# Altium footprint library Connector-Audio.PcbLib: 29 footprints (part 2 of 2)
Each footprint in its own frame and in the unit in brackets; x right, y up, seen from the top. Pads: shape width x height; smd on the part's side, far side on the other; paste and mask are expansions set on the pad; w line width, h text height; cw(c..) or ccw(c..) is an arc to the next point about the centre after c.
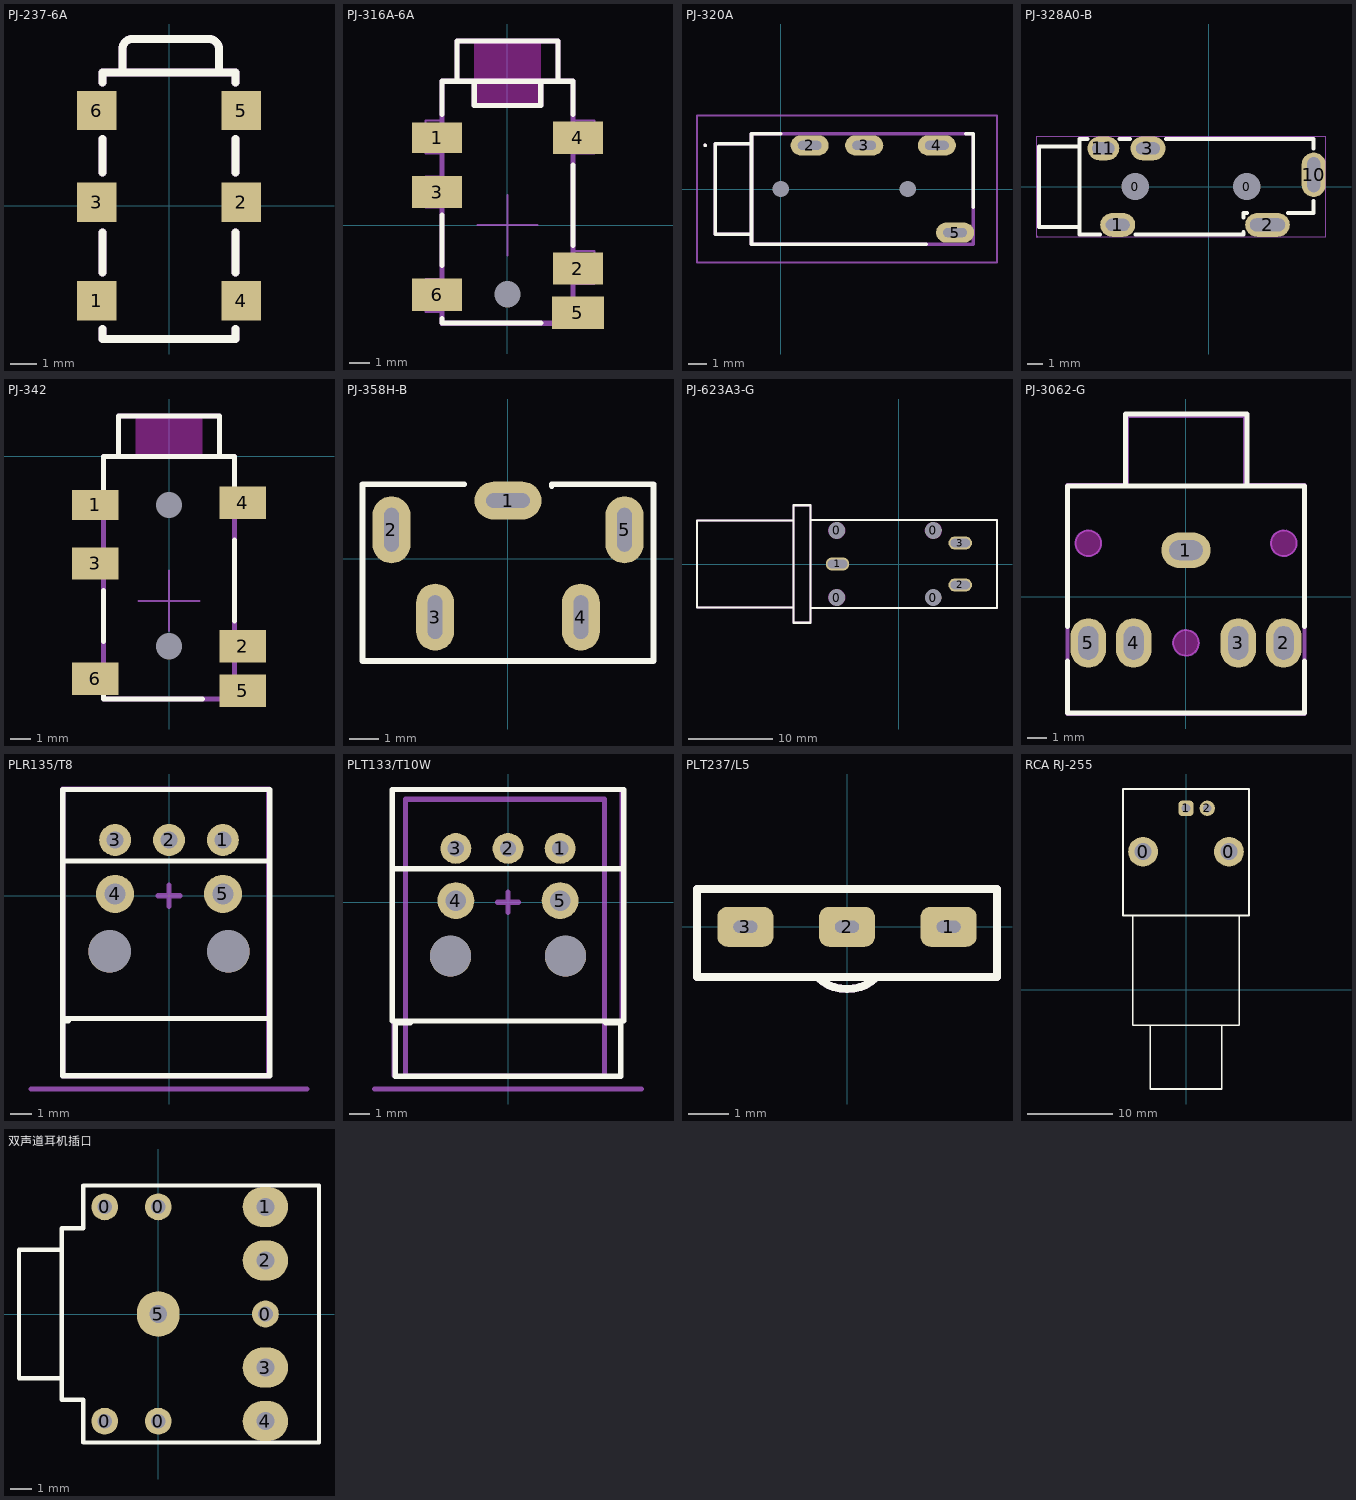
[diagram p1: the footprints below, top view; thin cyan lines are the x and y axes]

## PJ-237-6A [mm]
pads (6):
  rect 1.5x1.5 smd: 1(-2.75,-3.625) 2(2.75,0.125) 3(-2.75,0.125) 4(2.75,-3.625) 5(2.75,3.625) 6(-2.75,3.625)
Top Overlay:
  lines w0.3: -2.54,-4.699 -2.54,-5.08 2.54,-5.08 2.54,-4.699 ; -2.54,-2.54 -2.54,-1.016 ; -2.54,1.27 -2.54,2.54 ; -2.54,4.699 -2.54,5.08 2.54,5.08 2.54,4.699 ; -1.778,5.08 -1.778,5.969 cw(c-1.397,5.969) -1.397,6.35 1.524,6.35 cw(c1.524,5.969) 1.905,5.969 1.905,5.207 ; 2.54,-2.54 2.54,-1.016 ; 2.54,1.27 2.54,2.54 ; 1.905,5.207 cw(c1.778,5.207) 1.778,5.08 ccw(c1.778,5.207) 1.905,5.207
Mechanical 29:
  lines w0.3: -2.54,-4.699 -2.54,-5.08 2.54,-5.08 2.54,-4.699 ; -2.54,-2.54 -2.54,-1.016 ; -2.54,1.27 -2.54,2.54 ; -2.54,4.699 -2.54,5.08 2.54,5.08 2.54,4.699 ; -1.778,5.08 -1.778,5.969 cw(c-1.397,5.969) -1.397,6.35 1.524,6.35 cw(c1.524,5.969) 1.905,5.969 1.905,5.207 ; 2.54,-2.54 2.54,-1.016 ; 2.54,1.27 2.54,2.54 ; 1.905,5.207 cw(c1.778,5.207) 1.778,5.08 ccw(c1.778,5.207) 1.905,5.207
  text "'.Designator'" at -0.635,4.318 h2
3D body "2.5mm audio jack.STEP": height 4.06, standoff -0.01, extent -3.651,-5.223 3.683,6.747

## PJ-316A-6A [mm]
pads (7):
  rect 2.5x1.5 smd: 1(-3.5,4.35)
  rect 2.5x1.6 smd: 2(3.5,-2.15) 3(-3.5,1.65) 4(3.5,4.35) 6(-3.5,-3.45)
  rect 2.6x1.6 smd: 5(3.5,-4.35)
  round 1.1 hole 1.3 unplated: ""(0,-3.429)
Top Overlay:
  lines w0.254: -3.25,-4.635 -3.25,-4.85 1.65,-4.85 ; -3.25,-2 -3.25,0.5 ; -3.25,5.5 -3.25,7.15 3.25,7.15 3.25,5.5 ; -2.5,7.15 -2.499,8.356 -2.5,9.15 2.5,9.15 2.5,7.15 ; -1.65,7.15 -1.65,5.95 1.65,5.95 1.65,7.15 ; 3.25,-1 3.25,3
Keep-Out Layer:
  board cut-out: -1.65,9.25 1.65,9.25 1.65,5.95 -1.65,5.95
Board Outline:
  lines w0.2: -1.65,7.15 -1.65,5.95 ; -1.65,5.95 -1.65,5.95 ; -1.65,5.95 1.65,5.95 1.65,7.15 ; 1.65,7.15 1.65,7.15
Top Component Outline:
  lines w0.1: -4.064,-4.318 -4.064,-2.667 -3.25,-2.667 -3.25,0.889 -4.064,0.889 -4.064,2.413 -3.302,2.413 -3.302,3.556 -4.064,3.556 -4.064,5.207 -3.937,5.207 -3.302,5.207 -3.302,7.112 -2.54,7.112 -2.5,7.112 -2.5,9.144 2.5,9.144 2.5,7.15 3.25,7.15 3.25,5.207 3.302,5.207 4.318,5.207 4.318,3.556 3.302,3.556 3.302,-1.27 4.318,-1.27 4.318,-2.921 3.25,-2.921 3.302,-2.921 3.302,-3.683 4.318,-3.683 4.318,-4.953 -3.302,-4.953 -3.302,-4.318 -4.064,-4.318
Top Component Center:
  lines w0.1: -1.5,0 1.5,0 ; 0,-1.5 0,1.5
Top Value:
  text "'.Comment'" at 0.456,-3.301 h1.52
Top Designator:
  text "'.Designator'" at 0.594,-4.373 h1.52
Top Assembly (Mech20):
  lines w0.2: -3.35,1.25 -4.25,1.25 -4.25,2.25 -3.25,2.25 ; -3.25,-3.75 -4.25,-3.75 -4.25,-3 -4,-3 -3.25,-3 ; -3.25,4 -4.25,4 -4.25,4.75 -3.25,4.75 ; 3.25,-4.5 4.183,-4.5 4.183,-3.75 3.25,-3.75 ; 3.25,-2.5 4.25,-2.5 4.25,-1.75 3.25,-1.75 ; 3.25,4 4.25,4 4.25,5 3.25,5
  lines w0.254: -2.5,7.15 -2.499,8.356 -2.5,9.15 2.5,9.15 2.5,7.15 ; -1.65,7.15 -1.65,5.95 1.65,5.95 1.65,7.15 ; -3.25,-4.85 -3.25,7.15 3.25,7.15 3.25,-4.85 -3.25,-4.85
3D body "PJ-316A.stp": height 4.4, standoff -0.6, extent -4.1,-4.902 4.2,9.098

## PJ-320A [mm] "PJ-320A XKB Connectivity"
pads (6):
  oval 2.1x1.1 hole 0.5 slot 1.3 at 0 deg: 2(1.6,2.4) 3(4.6,2.4) 4(8.6,2.4) 5(9.6,-2.4)
  round 0.3 hole 0.9 unplated: MH1(0,0) MH2(7,0)
Top Overlay:
  lines w0.1: -4.2,2.4 cw(c-4.15,2.4) -4.1,2.4 cw(c-4.15,2.4) -4.2,2.4
  lines w0.2: -1.6,-2.5 -3.6,-2.5 -3.6,2.5 -1.6,2.5 ; 0,3.05 -1.6,3.05 -1.6,-3.05 8,-3.05 ; 10.2,3.05 10.6,3.05 10.6,-1
Top Value:
  text "'.Comment'" at -0.301,-0.456 h1.52
Top Designator:
  text "'.Designator'" at -1.373,-0.594 h1.52
Top Courtyard:
  lines w0.1: -4.6,-4.05 -4.6,4.05 11.91,4.05 11.91,-4.05 -4.6,-4.05
Top Assembly (Mech20):
  lines w0.1: -4.2,2.4 cw(c-4.15,2.4) -4.1,2.4 cw(c-4.15,2.4) -4.2,2.4
  lines w0.2: -1.6,-2.5 -3.6,-2.5 -3.6,2.5 -1.6,2.5 ; -1.6,-3.05 8,-3.05 10.6,-3.05 10.6,-1 10.6,3.05 10.2,3.05 -1.6,3.05 -1.6,-3.05
3D body "PJ-320A.step": height 5.08, standoff -1.72, extent -3.6,-3.06 10.6,3.05

## PJ-328A0-B [mm]
pads (7):
  round 1 hole 1.7 unplated: 0(-4.6,0) 0(2.4,0)
  oval 2.2x1.5 hole 0.75 slot 1.5 at 0 deg mask+0.051: 1(-5.7,-2.4)
  oval 2.799x1.501 hole 0.8 slot 2.2 at 0 deg mask+0.051: 2(3.701,-2.4)
  oval 2.2x1.501 hole 0.75 slot 1.5 at 0 deg mask+0.051: 3(-3.8,2.4)
  oval 1.501x2.799 hole 0.8 slot 2.2 at 90 deg mask+0.051: 10(6.599,0.749)
  oval 1.999x1.501 hole 0.75 slot 1.4 at 0 deg mask+0.051: 11(-6.599,2.4)
Top Overlay:
  lines w0.254: -8.1,-2.54 -10.64,-2.54 -10.64,2.525 -8.1,2.525 ; -7.783,3 -7.625,3 ; -7.592,3 -8.1,3 -8.1,-3 -6.873,-3 -6.825,-3 ; -5.575,3 -4.925,3 ; -5.527,3 -5.179,3 ; -4.575,-3 -4.417,-3 2.187,-3 2.187,-2.863 ; -2.675,3 -2.22,3 ; -2.53,3 6.599,3 6.599,2.38 ; 2.187,-1.935 2.187,-1.651 2.418,-1.651 ; 4.983,-1.651 6.599,-1.651 6.599,-0.889
Top Value:
  text "'.Comment'" at -3.301,-0.456 h1.52
Top Designator:
  text "'.Designator'" at -4.373,-0.594 h1.52
Top Assembly (Mech20):
  region: 6.2,0.15 6.2,1.351 7,1.351 7,0.15
  region: -6.843,2.766 -6.358,2.766 -6.358,2.035 -6.843,2.035
  region: -4.194,2.766 -3.406,2.766 -3.406,2.035 -4.194,2.035
  region: 3.099,-1.999 4.3,-1.999 4.3,-2.799 3.099,-2.799
  region: -6.093,-2.035 -5.306,-2.035 -5.306,-2.766 -6.093,-2.766
  region: 3.2,0 3.2,0.105 3.146,0.309 3.041,0.491 2.892,0.64 2.709,0.746 2.506,0.8 2.295,0.8 2.091,0.746 1.909,0.64 1.76,0.491 1.655,0.309 1.6,0.105 1.6,0 1.6,-0.105 1.655,-0.309 1.76,-0.491 1.909,-0.64 2.091,-0.746 2.295,-0.8 2.506,-0.8 2.709,-0.746 2.892,-0.64 3.041,-0.491 3.146,-0.309 3.2,-0.105 3.2,0
  region: -3.8,0 -3.8,0.105 -3.854,0.309 -3.96,0.491 -4.109,0.64 -4.291,0.746 -4.495,0.8 -4.705,0.8 -4.909,0.746 -5.091,0.64 -5.24,0.491 -5.346,0.309 -5.4,0.105 -5.4,0 -5.4,-0.105 -5.346,-0.309 -5.24,-0.491 -5.091,-0.64 -4.909,-0.746 -4.705,-0.8 -4.495,-0.8 -4.291,-0.746 -4.109,-0.64 -3.96,-0.491 -3.854,-0.309 -3.8,-0.105 -3.8,0
  region: -10.706,-3.15 -10.706,-3.124 -10.742,-3.089 -10.792,-3.089 -10.828,-3.124 -10.828,-3.15 -10.828,-3.175 -10.792,-3.211 -10.742,-3.211 -10.706,-3.175 -10.706,-3.15
  lines w0.051: -10.767,-3.15 -10.767,3.15 7.351,3.15 7.351,-3.15 -10.767,-3.15
3D body "pj-328a0-x.stp": height 5, standoff -2.5, extent -10.6,-3 6.75,3

## PJ-342 [mm] "SHOU HAN(首韩)  PJ-342"
pads (8):
  rect 2.3x1.5 smd: 1(-3.65,-2.4)
  rect 2.3x1.6 smd: 2(3.65,-9.4) 3(-3.65,-5.3) 4(3.65,-2.3) 5(3.65,-11.6) 6(-3.65,-11)
  round 1.1 hole 1.3 unplated: ""(0,-9.4) ""(0,-2.4)
Top Overlay:
  lines w0.254: -3.25,-11.785 -3.25,-12 1.65,-12 ; -3.25,-9.15 -3.25,-6.65 ; -3.25,-1.65 -3.25,0 3.25,0 3.25,-1.65 ; -2.5,0 -2.499,1.206 -2.5,2 2.5,2 2.5,0 ; 3.25,-8.15 3.25,-4.15
Keep-Out Layer:
  board cut-out: -1.65,2.1 1.65,2.1 1.65,0 -1.65,0
Top Component Center:
  lines w0.1: -1.5,-7.15 1.5,-7.15 ; 0,-8.65 0,-5.65
Top Value:
  text "'.Comment'" at 0.456,-10.451 h1.52
Top Designator:
  text "'.Designator'" at 0.594,-11.523 h1.52
Top Assembly (Mech20):
  lines w0.2: -3.35,-5.9 -4.25,-5.9 -4.25,-4.9 -3.25,-4.9 ; -3.25,-11.25 -4.25,-11.25 -4.25,-10.5 -4,-10.5 -3.25,-10.5 ; -3.25,-2.768 -4.25,-2.768 -4.25,-1.943 -3.25,-1.943 ; 3.249,-2.754 4.249,-2.754 4.249,-1.754 3.249,-1.754 ; 3.25,-12 4.183,-12 4.183,-11.25 3.25,-11.25 ; 3.25,-9.65 4.25,-9.65 4.25,-8.9 3.25,-8.9
  lines w0.254: -2.5,0 -2.499,1.206 -2.5,2 2.5,2 2.5,0 ; -3.25,-12 -3.25,0 3.25,0 3.25,-12 -3.25,-12
3D body "PJ-342.step": height 4.71, standoff -0.69, extent -4.2,-12.1 4.2,2

## PJ-358H-B [mm] "PJ-358H-B (XKB)"
pads (5):
  oval 2.3x1.3 hole 0.5 slot 1.5 at 0 deg mask+0.051: 1(0,2)
  oval 1.3x2.3 hole 0.5 slot 1.5 at 90 deg mask+0.051: 2(-4,1) 3(-2.5,-2) 4(2.5,-2) 5(4,1)
Top Overlay:
  lines w0.2: -1.5,2.561 -5,2.561 -5,-3.5 5,-3.5 5,2.561 1.5,2.561 1.5,2.5
Top Value:
  text "'.Comment'" at -3.333,-0.831 h1.52
Top Designator:
  text "'.Designator'" at -4.405,-0.969 h1.52
3D body "PJ-358H-B.step": height 15, standoff -2, extent -5,-3.46 5,2.55

## PJ-623A3-G [mm] "XKB Connection，6.35 HP Connecter"
pads (7):
  round 1.9 hole 2 unplated: 0(-7.395,-4) 0(-7.395,4) 0(4.105,-4) 0(4.105,4)
  oval 2.8x1.6 hole 1 slot 2.3 at 0 deg paste-2539.97 mask+0.05: 1(-7.305,0) 3(7.305,2.5)
  oval 2.8x1.6 hole 1 slot 2.3 at 0 deg copper offset 0,0 paste-2539.97 mask+0.05: 2(7.305,-2.5)
Top Overlay:
  lines w0.254: -24.035,-5.2 -24.035,5.2 -12.535,5.2 -12.535,-5.2 -24.035,-5.2 ; -12.535,-7 -12.535,7 -10.535,7 -10.535,-7 -12.535,-7 ; -10.515,-5.25 -10.515,5.25 11.684,5.25 11.684,-5.25 -10.515,-5.25
Keep-Out Layer:
  board cut-out: 5.105,4 5.105,4.132 5.037,4.386 4.905,4.614 4.719,4.8 4.491,4.932 4.237,5 3.973,5 3.719,4.932 3.491,4.8 3.305,4.614 3.173,4.386 3.105,4.132 3.105,4 3.105,3.868 3.173,3.614 3.305,3.386 3.491,3.2 3.719,3.068 3.973,3 4.237,3 4.491,3.068 4.719,3.2 4.905,3.386 5.037,3.614 5.105,3.868 5.105,4
  board cut-out: -6.395,-4 -6.395,-3.868 -6.463,-3.614 -6.595,-3.386 -6.781,-3.2 -7.009,-3.068 -7.263,-3 -7.527,-3 -7.781,-3.068 -8.009,-3.2 -8.195,-3.386 -8.327,-3.614 -8.395,-3.868 -8.395,-4 -8.395,-4.132 -8.327,-4.386 -8.195,-4.614 -8.009,-4.8 -7.781,-4.932 -7.527,-5 -7.263,-5 -7.009,-4.932 -6.781,-4.8 -6.595,-4.614 -6.463,-4.386 -6.395,-4.132 -6.395,-4
  board cut-out: -6.395,4 -6.395,4.132 -6.463,4.386 -6.595,4.614 -6.781,4.8 -7.009,4.932 -7.263,5 -7.527,5 -7.781,4.932 -8.009,4.8 -8.195,4.614 -8.327,4.386 -8.395,4.132 -8.395,4 -8.395,3.868 -8.327,3.614 -8.195,3.386 -8.009,3.2 -7.781,3.068 -7.527,3 -7.263,3 -7.009,3.068 -6.781,3.2 -6.595,3.386 -6.463,3.614 -6.395,3.868 -6.395,4
Top Value:
  text "'.Comment'" at -3.301,-0.456 h1.52
Top Designator:
  text "'.Designator'" at -4.373,-0.594 h1.52
Top Assembly (Mech20):
  lines w0.254: -24.035,-5.2 -24.035,5.2 -12.535,5.2 -12.535,-5.2 -24.035,-5.2 ; -12.535,-7 -12.535,7 -10.535,7 -10.535,-7 -12.535,-7 ; -10.515,-5.25 -10.515,5.25 11.684,5.25 11.684,-5.25 -10.515,-5.25
3D body "3D_PJ-623A3-G.step": height 11.05, standoff -4.95, extent -24.016,-7.032 11.684,6.968

## PJ-3062-G [mm] "PJ-3062-G (XKB)"
pads (5):
  oval 2.499x1.8 hole 1 slot 1.7 at 0 deg mask+0.051: 1(0,2.35)
  oval 1.8x2.499 hole 1 slot 1.7 at 90 deg mask+0.051: 2(4.95,-2.35) 3(2.65,-2.35) 4(-2.65,-2.35) 5(-4.95,-2.35)
Top Overlay:
  lines w0.254: -6,-3.275 -6,-5.9 6,-5.9 6,-3.275 ; -6,-1.525 -6,5.601 6,5.601 6,-1.525 ; -3.075,5.601 -3.075,9.25 3.1,9.25 3.1,5.601
Keep-Out Layer:
  drawing of 6 lines, arcs and shapes, not listed
Board Outline:
  circle w0.1: c0,-2.35 r0.65
  circle w0.1: c-4.95,2.7 r0.65
  circle w0.1: c4.95,2.7 r0.65
Top Value:
  text "'.Comment'" at -3.333,-0.481 h1.52
Top Designator:
  text "'.Designator'" at -4.405,-0.619 h1.52
Top Assembly (Mech20):
  region: 4.75,-1.825 5.15,-1.825 5.15,-2.875 4.75,-2.875
  region: -5.15,-1.825 -4.75,-1.825 -4.75,-2.875 -5.15,-2.875
  region: 2.45,-1.825 2.85,-1.825 2.85,-2.875 2.45,-2.875
  region: 0.525,2.55 0.525,2.15 -0.525,2.15 -0.525,2.55
  region: -2.85,-1.825 -2.45,-1.825 -2.45,-2.875 -2.85,-2.875
  lines w0.2: -6,-5.95 6,-5.95 6,5.65 3,5.65 3,9.15 -3,9.15 -3,5.65 -6,5.65 -6,-5.95
3D body "pj-3062-x.stp": height 10, standoff -4.2, extent -6,-5.95 6,9.15

## PLR135/T8 [mm] "光纤接收端子"
pads (7):
  round 1.5 hole 0.8: 1(2.54,2.625) 2(0,2.625) 3(-2.54,2.625)
  round 1.8 hole 1: 4(-2.54,0.085) 5(2.54,0.085)
  round 2 hole 2 unplated: ""(-2.8,-2.625) ""(2.8,-2.625)
Top Overlay:
  lines w0.254: -4.75,-5.884 -5,-5.884 -5,-8.475 4.75,-8.475 4.75,-5.884 ; -5,1.635 -5,-5.782 4.75,-5.782 4.75,1.635 ; -5,1.635 -5,5 4.75,5 4.75,1.635 ; -5,1.635 4.75,1.635
Top Component Outline:
  lines w0.254: -6.5,-9.1 6.5,-9.1 ; -5,-8.475 4.7,-8.475 4.7,5.025 -5,5.025 -5,-8.475
Top Component Center:
  lines w0.254: -0.5,0 0.5,0 ; 0,-0.5 0,0.5
Top Value:
  text "'.Comment'" at -5.6,-0.481 h2.54
Top Designator:
  text "'.Designator'" at -7.1,-0.256 h2.54
3D body "T015-2.step": height 9.6, standoff -3.55, extent -4.951,-8.62 4.699,4.98

## PLT133/T10W [mm]
pads (7):
  round 1.5 hole 0.8: 1(2.54,2.625) 2(0,2.625) 3(-2.54,2.625)
  round 1.8 hole 1: 4(-2.54,0.085) 5(2.54,0.085)
  round 2 hole 2 unplated: ""(-2.8,-2.625) ""(2.8,-2.625)
Top Overlay:
  lines w0.254: -4.75,-5.884 -5.5,-5.884 -5.5,-8.475 5.5,-8.475 5.5,-5.884 4.75,-5.884 ; -5.639,1.635 5.639,1.635 ; -5.639,1.635 -5.639,5.495 5.639,5.495 5.639,1.635 ; -5.639,1.635 -5.639,-5.782 5.639,-5.782 5.639,1.635
Top Component Outline:
  lines w0.254: -6.5,-9.1 6.5,-9.1 ; -5,-8.475 -5,5.025 4.7,5.025 4.7,-8.475 -5,-8.475
Top Component Center:
  lines w0.254: -0.5,0 0.5,0 ; 0,-0.5 0,0.5
Top Value:
  text "'.Comment'" at -5.6,-0.481 h2.54
Top Designator:
  text "'.Designator'" at -7.1,-0.256 h2.54
Bottom Courtyard:
  lines w0.152: -5.6,-8.475 -5.6,5.525 5.5,5.525 5.5,-8.375 5.4,-8.475 -5.6,-8.475
3D body "T015-2.step": height 9.6, standoff -3.55, extent -4.951,-8.62 4.699,4.98

## PLT237/L5 [mm]
pads (3):
  rrect50% 1.4x1 hole 0.6 slot 0.3 at 90 deg: 1(2.54,0) 2(0,0) 3(-2.54,0)
Top Overlay:
  lines w0.2: -0.75,-1.25 ccw(c0,-0.5) 0.75,-1.25 ; -3.75,-1.25 3.75,-1.25 3.75,0.95 -3.75,0.95 -3.75,-1.25
Top Component Outline:
  lines w0.2: -3.75,-1.25 3.75,-1.25 3.75,0.95 -3.75,0.95 ; -0.75,-1.25 ccw(c0,-0.5) 0.75,-1.25
Top Value:
  text "'.Comment'" at -2.592,-0.349 h1.2
Top Designator:
  text "'.Designator'" at -3.437,-0.252 h1.2
Top Assembly (Mech20):
  lines w0.2: -3.75,-1.25 3.75,-1.25 ; -3.75,-1.25 3.75,-1.25 ; -3.75,-1.25 -3.75,0.95 ; -3.75,0.95 3.75,0.95 ; -3.75,0.95 3.75,0.95 ; 3.75,-1.25 3.75,0.95 ; 3.75,-1.25 3.75,0.95 ; -0.75,-1.25 ccw(c0,-0.5) 0.75,-1.25 cw(c0,-0.5) -0.75,-1.25
3D body: height 3, standoff 0, extent -3.75,-1.25 3.75,1

## RCA RJ-255 [mm] "RCA莲花头AV接口座"
pads (4):
  round 3.5 hole 2: 0(-5.05,16.212) 0(5.05,16.212)
  rrect50% 1.8x1.8 hole 1: 1(0,21.312)
  round 1.8 hole 1: 2(2.5,21.312)
Top Overlay:
  lines w0.203: -6.25,8.7 -6.25,-4.2 6.25,-4.2 6.25,8.7 ; -4.2,-4.2 -4.2,-8.4 -4.2,-11.684 4.2,-11.684 4.2,-4.2 ; -7.417,8.7 7.417,8.7 7.417,23.584 -7.417,23.584 -7.417,8.7
3D body "RCA RJ-255-.STEP": height 13.95, standoff -5.35, extent -7.366,-11.708 7.334,23.392

## 双声道耳机插口 [mm]
height 5
pads (10):
  round 1.27 hole 0.7: 0(-2.54,-5.08) 0(-2.54,5.08) 0(0,-5.08) 0(0,5.08) 0(5.08,0)
  oval 2.159x1.905 hole 0.85: 1(5.08,5.08) 2(5.08,2.54) 3(5.08,-2.54) 4(5.08,-5.08)
  oval 2.032x2.159 hole 0.85: 5(0,0)
Top Overlay:
  lines w0.203: -4.572,-3.048 -6.604,-3.048 -6.604,3.048 -4.572,3.048 ; -4.572,-4.064 -4.572,4.064 -3.556,4.064 -3.556,6.096 7.62,6.096 7.62,-6.096 -3.556,-6.096 -3.556,-4.064 -4.572,-4.064
3D body: height 5, standoff 0.03, extent -3.556,-6.096 7.62,6.096
3D body: height 5, standoff 0.03, extent -4.572,-4.064 -3.556,4.064
3D body: height 5.99, standoff 0.01, extent -5.572,-2.988 -4.572,2.988
3D body: height 5.99, standoff 0.01, extent -6.588,-2.988 -5.588,2.988
3D body: height 4.8, standoff 1.2, extent -6.604,-1.808 -5.604,1.778
3D body: height 2.24, standoff -0.76, extent -0.305,4.781 0.294,5.379
3D body: height 2.24, standoff -0.76, extent -2.845,4.781 -2.246,5.379
3D body: height 2.24, standoff -0.76, extent -2.845,-5.379 -2.246,-4.781
3D body: height 2.24, standoff -0.76, extent -0.305,-5.379 0.294,-4.781
3D body: height 2.24, standoff -0.76, extent 4.775,-0.299 5.374,0.299
3D body: height 2.24, standoff -0.76, extent 4.58,4.584 5.578,5.58
3D body: height 2.24, standoff -0.76, extent 4.58,2.084 5.578,3.08
3D body: height 2.24, standoff -0.76, extent 4.58,-3.036 5.578,-2.04
3D body: height 2.24, standoff -0.76, extent 4.58,-5.576 5.578,-4.58
3D body: height 2.24, standoff -0.76, extent -0.5,-0.496 0.498,0.5